# Altium schematic symbol library IKW40N120H3.SchLib: 1 symbol
Pins are listed as number, name and electrical type; pins without a type are passive.

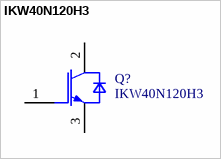
[diagram p0: symbol IKW40N120H3]

## IKW40N120H3
designator Q?
600V high speed switching series third generation, VCE 600V, IC 60A; Manufacturer: Infineon Technologies; Manufacturer Order Number: IKW40N120H3; PackageReference: PG-TO247-3-41
pins: 1 GATE, 2 COLLECTOR, 3 EMITTER